# EAGLE library part SPIFLASH-SOIC8 (library rtd2660_board)
SPI NOR flash 25-series, SOIC-8 (W25Q40 / MX25L4006)
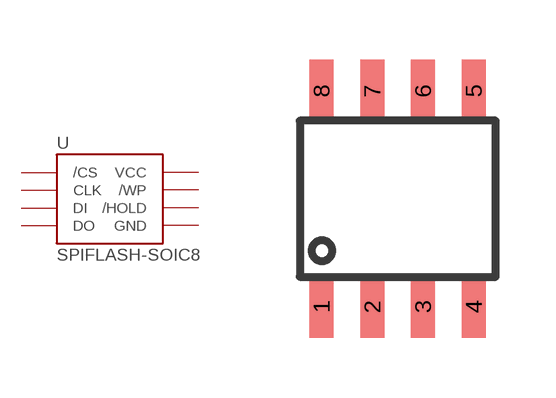
[diagram p11: symbol with the pads of SOIC8; footprint SOIC8]

Designator prefix U

## SPIFLASH-SOIC8  [SOIC8]
1  /CS  pas
2  DO  pas
3  /WP  pas
4  GND  pas
5  DI  pas
6  CLK  pas
7  /HOLD  pas
8  VCC  pas

## Footprint SOIC8 (pad centres in mm)
SOIC-8, 150 mil
smd 0.6 x 1.55: 1 -1.905,-2.7; 2 -0.635,-2.7; 3 0.635,-2.7; 4 1.905,-2.7; 5 1.905,2.7; 6 0.635,2.7; 7 -0.635,2.7; 8 -1.905,2.7